# Altium schematic symbol library TOF_Sensor.SchLib: 1 symbol
Pins are listed as number, name and electrical type; pins without a type are passive.

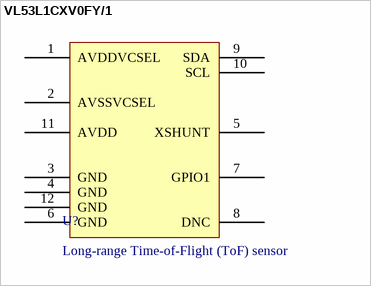
[diagram p0: symbol VL53L1CXV0FY/1]

## VL53L1CXV0FY/1
designator U?, comment Long-range Time-of-Flight (ToF) sensor
Manufacturer Part Number: VL53L1CXV0FY/1; Manufacturer: STMicroelectronics; Interface Type: I2C; Operating Supply Current: 16 mA; Supply Voltage - Max: 2.6 V; Supply Voltage - Min: 3.5 V; Value: VL53L1CXV0FY/1; Active: Active; Antenna interface: N/A; ComponentLink1Description: Datasheet; ComponentLink1URL: https://www.lcsc.com/datasheet/C190004.pdf?spm=wm.fly.bg.0.pdf&lcsc_vid=FlkIUABWQVJeAgZfQwdWUlcFT1ZYUV1ST1deUwVWQ1IxVlNfQ1JWUVJQQ1NeUjsOAxUeFF5JWBYZEEoKFBINSQcJGk4NBhADEA4cHktTQldADxALGw%3D%3D; LCSC Part #: C190004; Mount: SMD/SMT; Operating Temperature Max: + 80 C; Operating Temperature Min: - 20 C; Package / Case: LGA-12; Packaging: Tape and Reel; Pad count: N/A; Supplier 1 Part Number: 511-VL53L1CXV0FY/1; Supplier 1 URL: https://www.mouser.vn/en/ProductDetail/STMicroelectronics/VL53L1CXV0FY-1?qs=W0yvOO0ixfFQE5v5L6h6PA%3D%3D; Supplier 1: Mouser; Supplier 2 Part Number: 497-17764-2-ND; Supplier 2 URL: https://www.digikey.com/en/products/detail/stmicroelectronics/vl53l1cxv0fy-1/8258055; Supplier 2: Digi-Key; Supplier 3 Part Number: N/A; Supplier 3 URL: N/A; Supplier 3: thegioiic
footprint VL53L1CXV0FY1
pins: 1 AVDDVCSEL, 2 AVSSVCSEL, 3 GND, 4 GND, 5 XSHUNT, 6 GND, 7 GPIO1, 8 DNC, 9 SDA, 10 SCL, 11 AVDD, 12 GND